# Altium schematic symbol library GNSS - ATGM336H-5N31.SchLib: 1 symbol
Pins are listed as number, name and electrical type; pins without a type are passive.

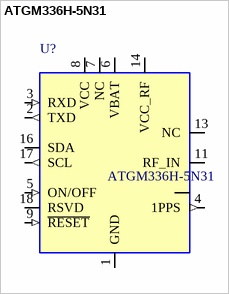
[diagram p0: symbol ATGM336H-5N31]

## ATGM336H-5N31
designator U?
BDS/GNSS All-constellation Positioning and Navigation Module; Manufacturer: ZHONGKEWEI; Manufacturer Part Number: ATGM336H-5N31; Supplier 1: LCSC; Supplier Part Number 1: C90770; Category: RF Receivers; Case/Package: SMD, 10.1x9.7mm; Operating Temperature: -40°C ~ 85°C; Lifecycle Status: Active; ComponentLink1Description: Datasheet; ComponentLink1URL: https://www.lcsc.com/datasheet/C90770.pdf; ComponentLink2Description: LCSC; ComponentLink2URL: https://www.lcsc.com/product-detail/C90770.html; Nota DigiKey: No disponible en DigiKey: excepcion documentada (como el U.FL en el documento de diseno)
footprint LCC-18 9.7x10.1 - ZKW (Huella LCC-18 9.7x10.1 - ZKW)
pins: 1 GND (power), 2 TXD (out), 3 RXD (in), 4 1PPS (out), 5 ON/OFF (in), 6 VBAT (power), 7 NC, 8 VCC (power), 9 ~{RESET} (in), 10 GND, 11 RF_IN, 12 GND, 13 NC, 14 VCC_RF (power), 15 RSVD, 16 SDA (io), 17 SCL (out), 18 RSVD